# Altium footprint library amirlib.PcbLib: 456 footprints (part 28 of 29)
Each footprint in its own frame and in the unit in brackets; x right, y up, seen from the top. Pads: shape width x height; smd on the part's side, far side on the other; paste and mask are expansions set on the pad; w line width, h text height; cw(c..) or ccw(c..) is an arc to the next point about the centre after c.
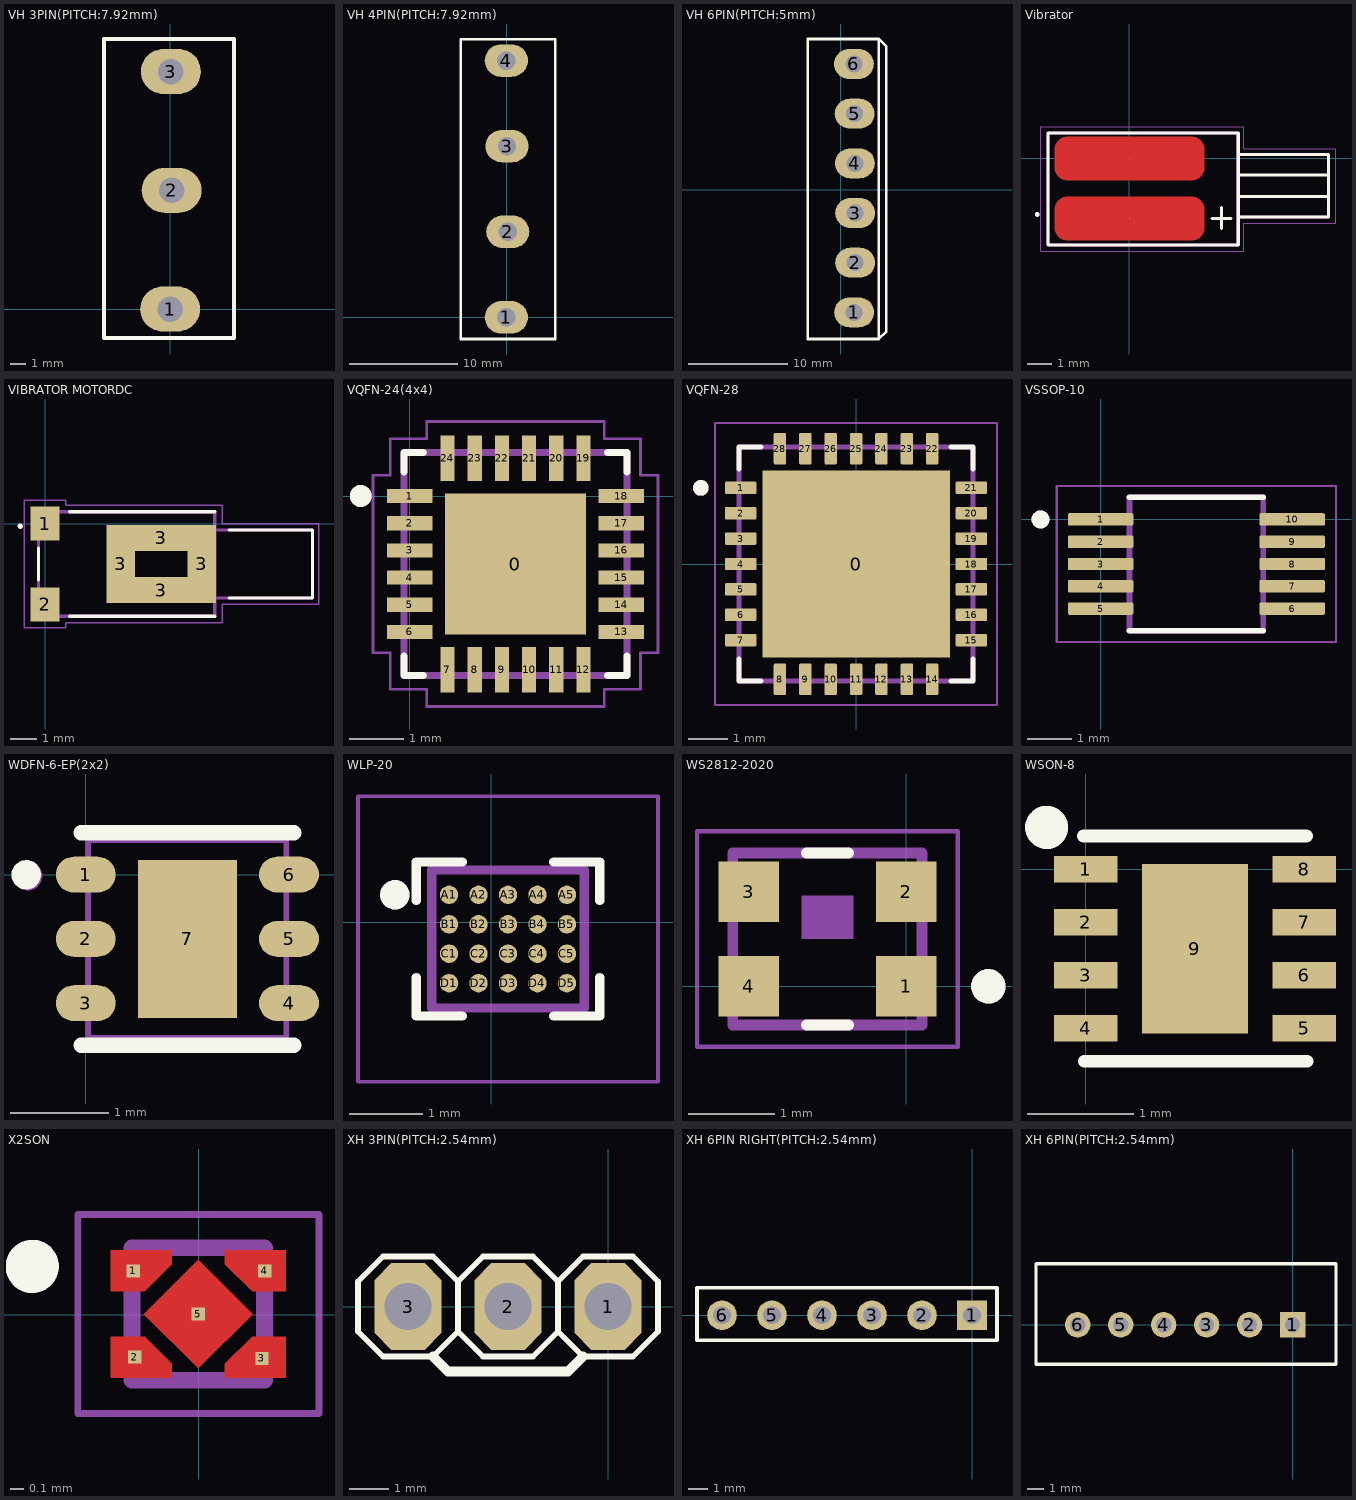
[diagram p27: the footprints below, top view; thin cyan lines are the x and y axes]

## VH 3PIN(PITCH:7.92mm) [mm]
pads (3):
  oval 4x3 hole 1.7: 1(0,0) 2(0.102,7.92) 3(0.051,15.84)
Top Overlay:
  lines w0.254: -4.42,-1.93 4.267,-1.93 4.267,18.009 -4.42,18.009 -4.42,-1.93
3D body "C161712_JST_B3P5-VH_3P_7p92.step": height 10.9, standoff -3.7, extent -4.301,-1.844 4.199,17.896

## VH 4PIN(PITCH:7.92mm) [mm]
pads (4):
  oval 4x3 hole 1.7: 1(-0.025,0) 2(0.102,7.92) 3(0.038,15.84) 4(-0.025,23.76)
Top Overlay:
  lines w0.254: -4.242,-2.007 -4.242,25.73 4.496,25.73 4.496,-2.007 -4.242,-2.007
3D body "C493411_JST_B4P7-VH-B_4P_7p92.step": height 10.9, standoff -3.7, extent -4.174,-1.968 4.326,25.692

## VH 6PIN(PITCH:5mm) [mm]
pads (6):
  oval 4x3 hole 1.7: 1(1.346,-12.319) 2(1.448,-7.336) 3(1.448,-2.352) 4(1.422,2.631) 5(1.397,7.615) 6(1.321,12.598)
Top Overlay:
  lines w0.254: -3.316,-14.993 3.803,-14.993 ; -3.309,15.106 -3.302,15.106 ; -3.302,-14.993 -3.302,15.106 ; -3.302,15.106 3.81,15.106 ; 3.803,-14.993 4.572,-14.224 4.572,14.351 3.817,15.106 3.81,15.106 ; 3.803,-14.993 3.81,-14.986 3.81,15.106
3D body "6PS-IO-Valve.STEP": height 10.06, standoff -3.53, extent -3.315,-14.816 4.636,15.164

## Vibrator [mil]
pads (2):
  round 1 smd: 1(0,-98.43) 2(0,0)
Top Layer:
  region: -122.05,-15.75 -122.05,-17.69 -121.29,-21.49 -119.81,-25.07 -117.65,-28.3 -114.91,-31.04 -111.69,-33.19 -108.1,-34.68 -104.3,-35.43 -102.36,-35.43 102.36,-35.43 104.3,-35.43 108.1,-34.68 111.69,-33.19 114.91,-31.04 117.65,-28.3 119.81,-25.07 121.29,-21.49 122.05,-17.69 122.05,-15.75 122.05,15.75 122.05,17.69 121.29,21.49 119.81,25.07 117.65,28.3 114.91,31.04 111.69,33.19 108.1,34.68 104.3,35.43 102.36,35.43 -102.36,35.43 -104.3,35.43 -108.1,34.68 -111.69,33.19 -114.91,31.04 -117.65,28.3 -119.81,25.07 -121.29,21.49 -122.05,17.69 -122.05,15.75
  region: -122.05,-114.17 -122.05,-116.11 -121.29,-119.92 -119.81,-123.5 -117.65,-126.72 -114.91,-129.46 -111.69,-131.62 -108.1,-133.1 -104.3,-133.86 -102.36,-133.86 102.36,-133.86 104.3,-133.86 108.1,-133.1 111.69,-131.62 114.91,-129.46 117.65,-126.72 119.81,-123.5 121.29,-119.92 122.05,-116.11 122.05,-114.17 122.05,-82.68 122.05,-80.74 121.29,-76.94 119.81,-73.35 117.65,-70.13 114.91,-67.39 111.69,-65.23 108.1,-63.75 104.3,-62.99 102.36,-62.99 -102.36,-62.99 -104.3,-62.99 -108.1,-63.75 -111.69,-65.23 -114.91,-67.39 -117.65,-70.13 -119.81,-73.35 -121.29,-76.94 -122.05,-80.74 -122.05,-82.68
Top Overlay:
  circle w3.94: c-151,-91.43 r1.97
  lines w5: 135,-98.43 166,-98.43 ; 150.5,-114.93 150.5,-98.43 150.5,-79.93 ; 178.4,-96.06 326.04,-96.06 326.04,6.34 ; 178.4,-27.24 326,-27.43 ; 178.5,-61.93 326.04,-61.93 ; 179,6.3 326.04,6.3 ; -133,-141.34 178,-141.44 178,41.57 -133,41.57 -133,-141.34
Mechanical 13:
  lines w5: 178.4,-96.06 326.04,-96.06 326.04,6.3 180.37,6.3 ; -133,-141.43 -133,41.57 178,41.57 178,-60.46 178,-141.43 -133,-141.43
Mechanical 15:
  lines w1.97: -145,-151.43 -82.01,-151.43 187,-151.43 187,-105.91 338,-105.91 338,16.14 187,16.14 187,51.57 -82.01,51.57 -145,51.57 -145,-151.43

## VIBRATOR MOTORDC [mm]
pads (6):
  rect 1.1x1.3 smd: 1(0,0) 2(0,-3.1)
  rect 1.1x3 smd: 3(2.9,-1.55) 3(6,-1.55)
  rect 2x1 smd: 3(4.45,-2.55) 3(4.45,-0.55)
Top Overlay:
  circle w0.1: c-0.95,-0.1 r0.05
  lines w0.127: -0.25,-2.15 -0.25,-0.95 ; 0.95,-3.55 6.5,-3.55 ; 0.95,0.45 6.5,0.45 ; 7.05,-2.85 10.25,-2.85 10.25,-0.25 7.05,-0.25
Mechanical 13:
  lines w0.127: 6.55,-0.25 10.25,-0.25 10.25,-2.85 6.5,-2.85 ; 6.5,-2.85 6.5,0.45 -0.25,0.45 -0.25,-3.55 6.5,-3.55 6.5,-2.85
Mechanical 15:
  lines w0.05: -0.8,-4 -0.8,0.9 0.8,0.9 0.8,0.7 6.8,0.7 6.8,0 10.5,0 10.5,-3.1 6.8,-3.1 6.8,-3.8 0.8,-3.8 0.8,-4 -0.8,-4

## VQFN-24(4x4) [mm]
pads (25):
  rect 2.6x2.6 smd paste-2: 0(1.945,-1.25)
  rect 0.84x0.26 smd: 1(0,0) 2(0,-0.5) 3(0,-1) 4(0,-1.5) 5(0,-2) 6(0,-2.5) 13(3.89,-2.5) 14(3.89,-2) 15(3.89,-1.5) 16(3.89,-1) 17(3.89,-0.5) 18(3.89,0)
  rect 0.26x0.84 smd: 7(0.695,-3.195) 8(1.195,-3.195) 9(1.695,-3.195) 10(2.195,-3.195) 11(2.695,-3.195) 12(3.195,-3.195) 19(3.195,0.695) 20(2.695,0.695) 21(2.195,0.695) 22(1.695,0.695) 23(1.195,0.695) 24(0.695,0.695)
Top Overlay:
  circle w0.3: c-0.9,0 r0.05
  lines w0.127: -0.105,-2.94 -0.105,-3.3 0.255,-3.3 ; -0.105,0.44 -0.105,0.8 0.255,0.8 ; 3.635,-3.3 3.995,-3.3 3.995,-2.94 ; 3.635,0.8 3.995,0.8 3.995,0.44
Top Paste:
  region: 1.82,-1.125 0.9,-1.125 0.9,-0.205 1.82,-0.205
  region: 2.99,-1.125 2.07,-1.125 2.07,-0.205 2.99,-0.205
  region: 2.99,-2.295 2.07,-2.295 2.07,-1.375 2.99,-1.375
  region: 1.82,-2.295 0.9,-2.295 0.9,-1.375 1.82,-1.375
Mechanical 13:
  circle w0.3: c-0.9,0 r0.05
  lines w0.127: -0.105,-3.3 -0.105,0.8 3.995,0.8 3.995,-3.3 -0.105,-3.3
Mechanical 15:
  lines w0.05: -0.675,-2.88 -0.675,0.38 -0.355,0.38 -0.355,1.05 0.315,1.05 0.315,1.37 3.575,1.37 3.575,1.05 4.245,1.05 4.245,0.38 4.565,0.38 4.565,-2.88 4.245,-2.88 4.245,-3.55 3.575,-3.55 3.575,-3.87 0.315,-3.87 0.315,-3.55 -0.355,-3.55 -0.355,-2.88 -0.675,-2.88
3D body "SX1262IMLTRT--3DModel-STEP-56544.STEP": height 1, standoff 0, extent -0.062,-3.269 3.938,0.731

## VQFN-28 [mm]
pads (29):
  rect 4.8x4.8 smd paste-3 mask+0.1: 0(0,0)
  rrect25% 0.81x0.32 smd mask+0.102: 1(-2.955,1.95) 2(-2.955,1.3) 3(-2.955,0.65) 4(-2.955,0) 5(-2.955,-0.65) 6(-2.955,-1.3) 7(-2.955,-1.95) 15(2.955,-1.95) 16(2.955,-1.3) 17(2.955,-0.65) 18(2.955,0) 19(2.955,0.65) 20(2.955,1.3) 21(2.955,1.95)
  rrect25% 0.32x0.81 smd mask+0.102: 8(-1.95,-2.955) 9(-1.3,-2.955) 10(-0.65,-2.955) 11(0,-2.955) 12(0.65,-2.955) 13(1.3,-2.955) 14(1.95,-2.955) 22(1.95,2.955) 23(1.3,2.955) 24(0.65,2.955) 25(0,2.955) 26(-0.65,2.955) 27(-1.3,2.955) 28(-1.95,2.955)
Top Overlay:
  circle w0.2: c-3.975,1.95 r0.1
  lines w0.127: -3,-2.43 -3,-3 -2.43,-3 ; -3,2.43 -3,3 -2.43,3 ; 2.43,-3 3,-3 3,-2.43 ; 2.43,3 3,3 3,2.43
Top Paste:
  region: -0.44,0.44 -1.96,0.44 -1.96,1.96 -0.44,1.96
  region: 1.96,0.44 0.44,0.44 0.44,1.96 1.96,1.96
  region: -0.44,-1.96 -1.96,-1.96 -1.96,-0.44 -0.44,-0.44
  region: 1.96,-1.96 0.44,-1.96 0.44,-0.44 1.96,-0.44
Mechanical 13:
  circle w0.2: c-3.975,1.95 r0.1
  lines w0.127: -3,-3 3,-3 3,3 -3,3 -3,-3
Mechanical 15:
  lines w0.05: -3.61,-3.61 3.61,-3.61 3.61,3.61 -3.61,3.61 -3.61,-3.61
3D body "step_temp.STEP": height 1, standoff 0, extent -3,-3 3,3

## VSSOP-10 [mm]
pads (10):
  rrect25% 1.47x0.28 smd: 1(0,0) 2(0,-0.5) 3(0,-1) 4(0,-1.5) 5(0,-2) 6(4.3,-2) 7(4.3,-1.5) 8(4.3,-1) 9(4.3,-0.5) 10(4.3,0)
Top Overlay:
  circle w0.2: c-1.35,0 r0.1
  lines w0.127: 0.65,-2.5 3.65,-2.5 ; 0.65,0.5 3.65,0.5
Mechanical 13:
  circle w0.2: c-1.35,0 r0.1
  lines w0.127: 0.65,-2.5 3.65,-2.5 3.65,0.5 0.65,0.5 0.65,-2.5
Mechanical 15:
  lines w0.05: -0.985,-2.75 5.285,-2.75 5.285,0.75 -0.985,0.75 -0.985,-2.75
3D body "step_temp.STEP": height 1.1, standoff 0, extent -0.3,-2.5 4.6,0.5

## WDFN-6-EP(2x2) [mil]
pads (7):
  oval 23.9x14.3 smd: 1(0,0) 2(0,-25.6) 3(0,-51.2) 4(81,-51.2) 5(81,-25.6) 6(81,0)
  rect 39.4x63 smd: 7(40.5,-25.6)
Top Overlay:
  lines w5.9: -26.6,-0.7 -26.6,0.7 -26,1.9 -24.8,2.7 -23.4,2.9 -22.1,2.4 -21.1,1.3 -20.8,0 -21.1,-1.4 -22.1,-2.5 -23.4,-3 -24.8,-2.8 -26,-2 -26.6,-0.7
  lines w6: -1.9,-68 82.9,-68 ; -1.9,16.7 82.9,16.7
Top Assembly:
  lines w5.9: -26,-1.1 -26,0.3 -25.4,1.5 -24.2,2.3 -22.8,2.5 -21.5,2 -20.6,0.9 -20.2,-0.4 -20.6,-1.8 -21.5,-2.9 -22.8,-3.4 -24.2,-3.2 -25.4,-2.4 -26,-1.1
Mechanical 6:
  lines w2: 1.1,-65 1.1,13.7 79.9,13.7 79.9,-65 1.1,-65
3D body "User Library-WDFN6_2x2.STEP": height 29.92, standoff 0, extent 0.55,-65.56 79.29,13.18

## WLP-20 [mm]
pads (20):
  round 0.25 smd: A1(-0.571,0.371) A2(-0.171,0.371) A3(0.229,0.371) A4(0.629,0.371) A5(1.029,0.371) B1(-0.571,-0.029) B2(-0.171,-0.029) B3(0.229,-0.029) B4(0.629,-0.029) B5(1.029,-0.029) C1(-0.571,-0.429) C2(-0.171,-0.429) C3(0.229,-0.429) C4(0.629,-0.429) C5(1.029,-0.429) D1(-0.571,-0.829) D2(-0.171,-0.829) D3(0.229,-0.829) D4(0.629,-0.829) D5(1.029,-0.829)
Top Overlay:
  circle w0.2: c-1.308,0.371 r0.1
  lines w0.127: -1.016,-0.751 -1.016,-1.274 -0.394,-1.274 ; -1.016,0.294 -1.016,0.816 -0.394,0.816 ; 0.851,-1.274 1.474,-1.274 1.474,-0.751 ; 0.851,0.816 1.474,0.816 1.474,0.294
Mechanical 13:
  circle w0.2: c-1.308,0.371 r0.1
  lines w0.127: -0.808,-1.165 1.265,-1.165 1.265,0.708 -0.808,0.708 -0.808,-1.165
Mechanical 15:
  lines w0.05: -1.808,-2.165 2.265,-2.165 2.265,1.708 -1.808,1.708 -1.808,-2.165
3D body "21-100134_N201A2-1_MXM.step": height 0.51, standoff 0, extent -0.8,-1.156 1.258,0.698

## WS2812-2020 [mm]
pads (4):
  rect 0.7x0.7 smd: 1(0,0) 2(0,1.1) 3(-1.83,1.1) 4(-1.83,0)
Top Overlay:
  circle w0.2: c0.955,0 r0.1
  lines w0.127: -1.16,-0.45 -0.67,-0.45 ; -1.16,1.55 -0.67,1.55
Mechanical 13:
  circle w0.2: c0.955,0 r0.1
  region: -0.615,0.55 -1.215,0.55 -1.215,1.05 -0.615,1.05
  lines w0.127: -2.015,-0.45 -2.015,1.55 0.185,1.55 0.185,-0.45 -2.015,-0.45
Mechanical 15:
  lines w0.05: -2.43,-0.7 0.6,-0.7 0.6,1.8 -2.43,1.8 -2.43,-0.7
3D body "step_temp.STEP": height 0.84, standoff 0, extent -2.015,-0.45 0.185,1.55

## WSON-8 [mm]
pads (9):
  rect 0.6x0.25 smd paste+0 mask+0.05: 1(0,0) 2(0,-0.5) 3(0,-1) 4(0,-1.5) 5(2.058,-1.5) 6(2.058,-1) 7(2.058,-0.5) 8(2.058,0)
  rect 1x1.6 smd paste+0 mask+0.05: 9(1.029,-0.75)
Top Overlay:
  circle w0.254: c-0.368,0.393 r0.076
  lines w0.12: -0.021,0.313 2.079,0.313 ; -0.011,-1.81 2.088,-1.81
Mechanical 15:
  circle w0.2: c-0.368,0.393 r0.1
3D body "User Library-WSON-8-1.STEP": height 0.8, standoff -0.01, extent -0.471,-2.26 2.529,0.76

## X2SON [mm]
pads (5):
  rect 0.1x0.1 smd paste-1 mask+0: 1(-0.495,0.33) 2(-0.485,-0.32) 3(0.475,-0.33) 4(0.495,0.33) 5(-0.005,0.005)
Top Layer:
  region: 0.405,0.005 -0.005,-0.405 -0.415,0.005 -0.005,0.415
  region: -0.205,-0.37 -0.205,-0.475 -0.665,-0.475 -0.665,-0.165 -0.41,-0.165
  region: 0.655,-0.475 0.195,-0.475 0.195,-0.37 0.4,-0.165 0.655,-0.165
  region: 0.655,0.175 0.4,0.175 0.195,0.38 0.195,0.485 0.655,0.485
  region: -0.205,0.38 -0.41,0.175 -0.665,0.175 -0.665,0.485 -0.205,0.485
Top Overlay:
  circle w0.2: c-1.257,0.364 r0.1
Top Paste:
  region: -0.255,0.405 -0.435,0.225 -0.655,0.225 -0.655,0.435 -0.255,0.435
  region: -0.255,-0.395 -0.255,-0.425 -0.655,-0.425 -0.655,-0.215 -0.435,-0.215
  region: 0.645,-0.425 0.245,-0.425 0.245,-0.395 0.425,-0.215 0.645,-0.215
  region: 0.313,0.005 -0.005,-0.313 -0.323,0.005 -0.005,0.323
  region: 0.645,0.225 0.425,0.225 0.245,0.405 0.245,0.435 0.645,0.435
Top Solder:
  region: 0.334,0.005 -0.005,-0.334 -0.344,0.005 -0.005,0.344
  region: -0.255,-0.395 -0.255,-0.425 -0.615,-0.425 -0.615,-0.215 -0.435,-0.215
  region: 0.605,-0.425 0.245,-0.425 0.245,-0.395 0.425,-0.215 0.605,-0.215
  region: 0.605,0.225 0.425,0.225 0.245,0.405 0.245,0.435 0.605,0.435
  region: -0.255,0.405 -0.435,0.225 -0.615,0.225 -0.615,0.435 -0.255,0.435
Mechanical 13:
  circle w0.2: c-1.257,0.364 r0.1
  lines w0.127: -0.505,-0.495 -0.505,0.505 0.495,0.505 0.495,-0.495 -0.505,-0.495
Mechanical 15:
  lines w0.05: -0.915,-0.745 0.905,-0.745 0.905,0.755 -0.915,0.755 -0.915,-0.745
3D body "TLV75533PDQNR.STEP": height 0.4, standoff 0, extent -0.505,-0.495 0.495,0.505

## XH 3PIN(PITCH:2.54mm) [mm]
pads (3):
  oct 1.7x2.2 hole 1.2: 1(0,0) 2(-2.54,0) 3(-5.08,0)
Top Overlay:
  region: -2.286,0.254 -2.794,0.254 -2.794,-0.254 -2.286,-0.254
  region: 0.254,0.254 -0.254,0.254 -0.254,-0.254 0.254,-0.254
  region: -4.826,0.254 -5.334,0.254 -5.334,-0.254 -4.826,-0.254
  lines w0.152: -3.81,-0.635 -3.175,-1.27 -1.905,-1.27 -1.27,-0.635 ; -3.81,-0.635 -3.81,0.635 ; -3.81,-0.635 -4.445,-1.27 -5.715,-1.27 -6.35,-0.635 -6.35,0.635 -5.715,1.27 -4.445,1.27 -3.81,0.635 ; -3.81,0.635 -3.175,1.27 -1.905,1.27 -1.27,0.635 ; -1.27,-0.635 -0.635,-1.27 0.635,-1.27 1.27,-0.635 1.27,0.635 0.635,1.27 -0.635,1.27 -1.27,0.635 ; -1.27,-0.635 -1.27,0.635
  lines w0.254: -4.445,-1.27 -4.064,-1.651 -1.016,-1.651 -0.635,-1.27
3D body "3PS-IO-Tachometer.STEP": height 8.84, standoff -3.36, extent -7.286,-3.225 2.714,3.175

## XH 6PIN RIGHT(PITCH:2.54mm) [mm]
pads (6):
  rect 1.5x1.5 hole 0.9: 1(0,0)
  round 1.5 hole 0.9: 2(-2.54,0) 3(-5.08,0) 4(-7.62,0) 5(-10.16,0) 6(-12.7,0)
Top Overlay:
  lines w0.2: -13.97,-1.27 -13.97,1.397 1.27,1.397 1.27,-1.27 -13.97,-1.27
3D body "6PR-CTRL-NTC.STEP": height 2.78, standoff -8.02, extent -15.1,-3.556 2.4,9.044

## XH 6PIN(PITCH:2.54mm) [mm]
pads (6):
  rect 1.5x1.5 hole 0.9: 1(0,0)
  round 1.5 hole 0.9: 2(-2.54,0) 3(-5.08,0) 4(-7.62,0) 5(-10.16,0) 6(-12.7,0)
Top Overlay:
  lines w0.2: -15.164,-2.337 -15.164,3.607 2.565,3.607 2.565,-2.337 -15.164,-2.337
3D body "XH_2.50mm_6Pin_Straight_Male.step": height 7.05, standoff -3.35, extent -15.049,-2.265 2.451,3.485